# Altium footprint library Footprint.PcbLib: 411 footprints (part 14 of 26)
Each footprint in its own frame and in the unit in brackets; x right, y up, seen from the top. Pads: shape width x height; smd on the part's side, far side on the other; paste and mask are expansions set on the pad; w line width, h text height; cw(c..) or ccw(c..) is an arc to the next point about the centre after c.
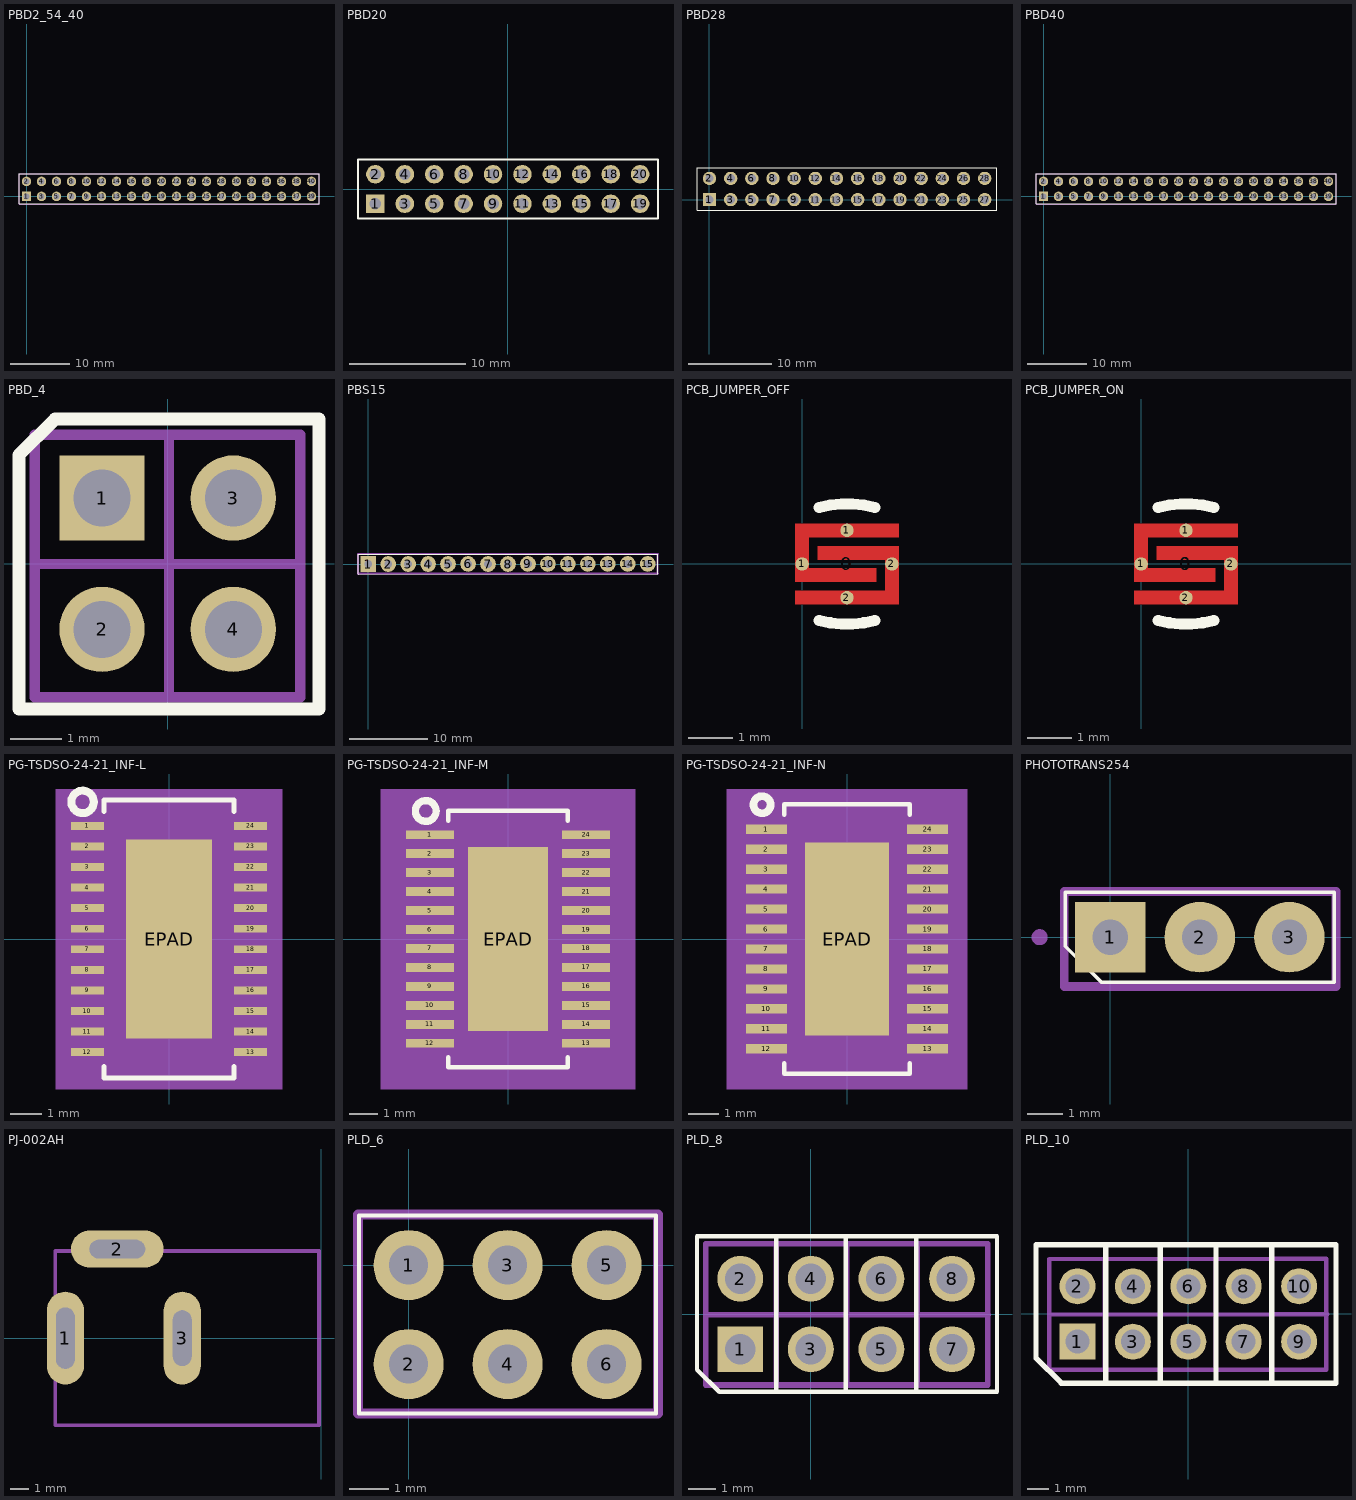
[diagram p13: the footprints below, top view; thin cyan lines are the x and y axes]

## PBD2_54_40 [mm]
pads (40):
  rect 1.6x1.6 hole 1: 1(0,0)
  round 1.6 hole 1: 2(0,2.54) 3(2.54,0) 4(2.54,2.54) 5(5.08,0) 6(5.08,2.54) 7(7.62,0) 8(7.62,2.54) 9(10.16,0) 10(10.16,2.54) 11(12.7,0) 12(12.7,2.54) 13(15.24,0) 14(15.24,2.54) 15(17.78,0) 16(17.78,2.54) 17(20.32,0) 18(20.32,2.54) 19(22.86,0) 20(22.86,2.54) 21(25.4,0) 22(25.4,2.54) 23(27.94,0) 24(27.94,2.54) 25(30.48,0) 26(30.48,2.54) 27(33.02,0) 28(33.02,2.54) 29(35.56,0) 30(35.56,2.54) 31(38.1,0) 32(38.1,2.54) 33(40.64,0) 34(40.64,2.54) 35(43.18,0) 36(43.18,2.54) 37(45.72,0) 38(45.72,2.54) 39(48.26,0) 40(48.26,2.54)
Top Overlay:
  lines w0.15: -1.27,-1.27 49.53,-1.27 49.53,3.81 -1.27,3.81 -1.27,-1.27
Mechanical 3:
  lines w0.1: -1.27,-1.295 -1.27,3.805 49.53,3.805 49.53,-1.295 -1.27,-1.295
3D body "User Library-PBD2_54-40.STEP": height 8.4, standoff -2.7, extent -1.263,-1.27 49.537,3.81

## PBD20 [mm]
pads (20):
  rect 1.6x1.6 hole 1: 1(-11.43,-1.27)
  round 1.6 hole 1: 2(-11.43,1.27) 3(-8.89,-1.27) 4(-8.89,1.27) 5(-6.35,-1.27) 6(-6.35,1.27) 7(-3.81,-1.27) 8(-3.81,1.27) 9(-1.27,-1.27) 10(-1.27,1.27) 11(1.27,-1.27) 12(1.27,1.27) 13(3.81,-1.27) 14(3.81,1.27) 15(6.35,-1.27) 16(6.35,1.27) 17(8.89,-1.27) 18(8.89,1.27) 19(11.43,-1.27) 20(11.43,1.27)
Top Overlay:
  lines w0.15: -12.93,-2.54 -12.93,2.54 12.97,2.54 12.97,-2.54 -12.93,-2.54
3D body "User Library-PBD_(DS1023-2)_2line_connectors_h=5_0_8_5mm_step_2_54mm (1).step": height 8.5, standoff -3, extent -12.95,-2.48 12.95,2.52

## PBD28 [mm]
pads (28):
  rect 1.6x1.6 hole 1: 1(0,0)
  round 1.6 hole 1: 2(0,2.54) 3(2.54,0) 4(2.54,2.54) 5(5.08,0) 6(5.08,2.54) 7(7.62,0) 8(7.62,2.54) 9(10.16,0) 10(10.16,2.54) 11(12.7,0) 12(12.7,2.54) 13(15.24,0) 14(15.24,2.54) 15(17.78,0) 16(17.78,2.54) 17(20.32,0) 18(20.32,2.54) 19(22.86,0) 20(22.86,2.54) 21(25.4,0) 22(25.4,2.54) 23(27.94,0) 24(27.94,2.54) 25(30.48,0) 26(30.48,2.54) 27(33.02,0) 28(33.02,2.54)
Top Overlay:
  lines w0.15: -1.5,-1.27 -1.5,3.81 34.5,3.81 34.5,-1.27 -1.5,-1.27
3D body "User Library-PBD_(DS1023-2)_2line_connectors_h=5_0_8_5mm_step_2_54mm.step": height 8.5, standoff -3, extent -1.52,-1.21 34.54,3.79

## PBD40 [mm]
pads (40):
  rect 1.6x1.6 hole 1: 1(0,0)
  round 1.6 hole 1: 2(0,2.54) 3(2.54,0) 4(2.54,2.54) 5(5.08,0) 6(5.08,2.54) 7(7.62,0) 8(7.62,2.54) 9(10.16,0) 10(10.16,2.54) 11(12.7,0) 12(12.7,2.54) 13(15.24,0) 14(15.24,2.54) 15(17.78,0) 16(17.78,2.54) 17(20.32,0) 18(20.32,2.54) 19(22.86,0) 20(22.86,2.54) 21(25.4,0) 22(25.4,2.54) 23(27.94,0) 24(27.94,2.54) 25(30.48,0) 26(30.48,2.54) 27(33.02,0) 28(33.02,2.54) 29(35.56,0) 30(35.56,2.54) 31(38.1,0) 32(38.1,2.54) 33(40.64,0) 34(40.64,2.54) 35(43.18,0) 36(43.18,2.54) 37(45.72,0) 38(45.72,2.54) 39(48.26,0) 40(48.26,2.54)
Top Overlay:
  lines w0.15: -1.27,-1.27 49.53,-1.27 49.53,3.81 -1.27,3.81 -1.27,-1.27
Mechanical 3:
  lines w0.1: -1.27,-1.295 -1.27,3.805 49.53,3.805 49.53,-1.295 -1.27,-1.295
3D body "User Library-PBD2_54-40.STEP": height 8.4, standoff -2.7, extent -1.263,-1.27 49.537,3.81

## PBD_4 [mm] "HEADER_2X2"
pads (4):
  rect 1.65x1.65 hole 1.1: 1(-1.27,1.27)
  round 1.65 hole 1.1: 2(-1.27,-1.27) 3(1.27,1.27) 4(1.27,-1.27)
Top Overlay:
  lines w0.25: -2.875,-2.805 -2.875,2.105 -2.179,2.795 2.925,2.795 2.925,-2.805 -2.875,-2.805
Assembly Bottom:
  lines w0.2: -2.57,2.495 -2.57,-2.58 2.49,-2.58 2.565,-2.58 ; -2.515,-0.005 2.565,-0.005 ; -2.515,2.495 2.565,2.495 2.565,-2.505 2.565,-2.58 ; 0.025,-2.505 0.025,2.495 ; 2.565,-2.58 2.565,-2.58
3D body "PBD.STEP": height 2.5, standoff -9, extent 0.025,-2.505 2.565,2.495
3D body "PBD.STEP": height 2.5, standoff -9, extent -2.515,-2.505 0.025,2.495

## PBS15 [mm]
pads (15):
  rect 2x2 hole 1: 1(0,0)
  round 2 hole 1: 2(2.54,0) 3(5.08,0) 4(7.62,0) 5(10.15,0) 6(12.7,0.01) 7(15.24,0) 8(17.78,0) 9(20.32,0.01) 10(22.86,0.01) 11(25.4,0.01) 12(27.94,0.01) 13(30.48,0.01) 14(33.02,0.01) 15(35.56,0.01)
Top Overlay:
  lines w0.1: -1.28,-1.28 36.83,-1.265 36.83,1.27 -1.27,1.27 -1.27,-1.27
Mechanical 15:
  circle w0.254: c0,0 r0.361
  lines w0.254: 36.8,-1.3 36.8,1.3 ; 36.83,-1.2 -1.2,-1.2 -1.3,-1.3 -1.3,1.3 36.86,1.3
3D body "User Library-PBS_(DS1023)_1line_connectors_h=5_0_8_5mm_step_2_54mm-1.step": height 8.5, standoff -3, extent -1.52,-1.25 29.46,1.25
3D body "User Library-PBS_(DS1023)_1line_connectors_h=5_0_8_5mm_step_2_54mm-1 (1).step": height 8.5, standoff -3, extent 28.96,-1.25 37.08,1.25

## PCB_JUMPER_OFF [mm] "soldable jumper OFF state"
pads (5):
  rect 2.5x2 on Top Solder: 0(1,0)
  round 0.3 smd paste-50 mask-50: 1(0,0) 1(1,0.75) 2(1,-0.75) 2(2,0)
Top Layer:
  region: 2.15,0.4 2.15,-0.9 -0.15,-0.9 -0.15,-0.6 1.85,-0.6 1.85,0.1 0.35,0.1 0.35,0.4
  region: -0.15,-0.4 -0.15,0.9 2.15,0.9 2.15,0.6 0.15,0.6 0.15,-0.1 1.65,-0.1 1.65,-0.4
Top Overlay:
  lines w0.25: 0.38,-1.257 ccw(c1,1) 1.62,-1.257 ; 0.384,1.258 cw(c1,-1) 1.616,1.258

## PCB_JUMPER_ON [mm] "soldable jumper ON state"
pads (6):
  rect 2.5x2 on Top Paste: 0(1,0)
  rect 2.5x2 on Top Solder: 0(1,0)
  round 0.3 smd paste-50 mask-50: 1(0,0) 1(1,0.75) 2(1,-0.75) 2(2,0)
Top Layer:
  region: -0.15,-0.4 -0.15,0.9 2.15,0.9 2.15,0.6 0.15,0.6 0.15,-0.1 1.65,-0.1 1.65,-0.4
  region: 2.15,0.4 2.15,-0.9 -0.15,-0.9 -0.15,-0.6 1.85,-0.6 1.85,0.1 0.35,0.1 0.35,0.4
Top Overlay:
  lines w0.25: 0.38,-1.257 ccw(c1,1) 1.62,-1.257 ; 0.384,1.258 cw(c1,-1) 1.616,1.258

## PG-TSDSO-24-21_INF-L [mil]
pads (25):
  rect 41.75x10 smd paste+0 mask+0: 1(-103.03,143) 2(-103.03,117) 3(-103.03,91) 4(-103.03,65) 5(-103.03,39) 6(-103.03,13) 7(-103.03,-13) 8(-103.03,-39) 9(-103.03,-65) 10(-103.03,-91) 11(-103.03,-117) 12(-103.03,-143) 13(103.03,-143) 14(103.03,-117) 15(103.03,-91) 16(103.03,-65) 17(103.03,-39) 18(103.03,-13) 19(103.03,13) 20(103.03,39) 21(103.03,65) 22(103.03,91) 23(103.03,117) 24(103.03,143)
  rect 109x252 smd paste-125.5 mask+0: EPAD(0,0)
Top Overlay:
  circle w10: c-109.19,173.2 r14.2
  lines w6: -82,-161.1 -82,-175.5 82,-175.5 82,-161.1 ; -82,161.1 -82,175.5 82,175.5 82,161.1
Top Paste:
  region: -3.94,122.06 -50.56,122.06 -50.56,79.54 -3.94,79.54
  region: -3.94,71.66 -50.56,71.66 -50.56,29.14 -3.94,29.14
  region: -3.94,21.26 -50.56,21.26 -50.56,-21.26 -3.94,-21.26
  region: -3.94,-29.14 -50.56,-29.14 -50.56,-71.66 -3.94,-71.66
  region: -3.94,-79.54 -50.56,-79.54 -50.56,-122.06 -3.94,-122.06
  region: 50.56,122.06 3.94,122.06 3.94,79.54 50.56,79.54
  region: 50.56,71.66 3.94,71.66 3.94,29.14 50.56,29.14
  region: 50.56,21.26 3.94,21.26 3.94,-21.26 50.56,-21.26
  region: 50.56,-29.14 3.94,-29.14 3.94,-71.66 50.56,-71.66
  region: 50.56,-79.54 3.94,-79.54 3.94,-122.06 50.56,-122.06
Assembly Bottom:
  region: 142.91,-189.5 -142.91,-189.5 -142.91,189.5 142.91,189.5
Mechanical 13:
  lines w0: -12,170.5 ccw(c0,170.5) 12,170.5
  lines w1: -118,-148 -118,-138 -77,-138 -77,-148 -118,-148 ; -118,-122 -118,-112 -77,-112 -77,-122 -118,-122 ; -118,-96 -118,-86 -77,-86 -77,-96 -118,-96 ; -118,-70 -118,-60 -77,-60 -77,-70 -118,-70 ; -118,-44 -118,-34 -77,-34 -77,-44 -118,-44 ; -118,-18 -118,-8 -77,-8 -77,-18 -118,-18 ; -118,8 -118,18 -77,18 -77,8 -118,8 ; -118,34 -118,44 -77,44 -77,34 -118,34 ; -118,60 -118,70 -77,70 -77,60 -118,60 ; -118,86 -118,96 -77,96 -77,86 -118,86 ; -118,112 -118,122 -77,122 -77,112 -118,112 ; -118,138 -118,148 -77,148 -77,138 -118,138 ; -77,-170.5 77,-170.5 77,170.5 -77,170.5 -77,-170.5 ; 77,-148 77,-138 118,-138 118,-148 77,-148 ; 77,-122 77,-112 118,-112 118,-122 77,-122 ; 77,-96 77,-86 118,-86 118,-96 77,-96 ; 77,-70 77,-60 118,-60 118,-70 77,-70 ; 77,-44 77,-34 118,-34 118,-44 77,-44 ; 77,-18 77,-8 118,-8 118,-18 77,-18 ; 77,8 77,18 118,18 118,8 77,8 ; 77,34 77,44 118,44 118,34 77,34 ; 77,60 77,70 118,70 118,60 77,60 ; 77,86 77,96 118,96 118,86 77,86 ; 77,112 77,122 118,122 118,112 77,112 ; 77,138 77,148 118,148 118,138 77,138
  text "*" at -74.5,117.5 h50
Mechanical 15:
  region: -81,-152 -127.91,-152 -127.91,152 -81,152 -81,174.5 81,174.5 81,152 127.91,152 127.91,-152 81,-152 81,-174.5 -81,-174.5
  lines w6: -127.91,-152 -127.91,152 -81,152 -81,174.5 81,174.5 81,152 127.91,152 127.91,-152 81,-152 81,-174.5 -81,-174.5 -81,-152 -127.91,-152
3D body "PG-TSDSO-24-21_INF.step": height 45.12, standoff 0, extent -117.99,-170.51 118,170.52

## PG-TSDSO-24-21_INF-M [mil]
pads (25):
  rect 65.37x11.97 smd paste+0 mask+0: 1(-106.97,143) 2(-106.97,117) 3(-106.97,91) 4(-106.97,65) 5(-106.97,39) 6(-106.97,13) 7(-106.97,-13) 8(-106.97,-39) 9(-106.97,-65) 10(-106.97,-91) 11(-106.97,-117) 12(-106.97,-143) 13(106.97,-143) 14(106.97,-117) 15(106.97,-91) 16(106.97,-65) 17(106.97,-39) 18(106.97,-13) 19(106.97,13) 20(106.97,39) 21(106.97,65) 22(106.97,91) 23(106.97,117) 24(106.97,143)
  rect 109x252 smd paste-125.5 mask+0: EPAD(0,0)
Top Overlay:
  circle w10: c-112.7,175.37 r14.2
  lines w6: -82,-162.08 -82,-175.5 82,-175.5 82,-162.08 ; -82,162.08 -82,175.5 82,175.5 82,162.08
Top Paste:
  region: 50.56,-79.54 3.94,-79.54 3.94,-122.06 50.56,-122.06
  region: 50.56,-29.14 3.94,-29.14 3.94,-71.66 50.56,-71.66
  region: 50.56,21.26 3.94,21.26 3.94,-21.26 50.56,-21.26
  region: 50.56,71.66 3.94,71.66 3.94,29.14 50.56,29.14
  region: 50.56,122.06 3.94,122.06 3.94,79.54 50.56,79.54
  region: -3.94,-79.54 -50.56,-79.54 -50.56,-122.06 -3.94,-122.06
  region: -3.94,-29.14 -50.56,-29.14 -50.56,-71.66 -3.94,-71.66
  region: -3.94,21.26 -50.56,21.26 -50.56,-21.26 -3.94,-21.26
  region: -3.94,71.66 -50.56,71.66 -50.56,29.14 -3.94,29.14
  region: -3.94,122.06 -50.56,122.06 -50.56,79.54 -3.94,79.54
Assembly Bottom:
  region: 174.65,-205.5 -174.65,-205.5 -174.65,205.5 174.65,205.5
Mechanical 13:
  lines w0: -12,170.5 ccw(c0,170.5) 12,170.5
  lines w1: -118,-148 -77,-148 -77,-138 -118,-138 -118,-148 ; -118,-122 -77,-122 -77,-112 -118,-112 -118,-122 ; -118,-96 -77,-96 -77,-86 -118,-86 -118,-96 ; -118,-70 -77,-70 -77,-60 -118,-60 -118,-70 ; -118,-44 -77,-44 -77,-34 -118,-34 -118,-44 ; -118,-18 -77,-18 -77,-8 -118,-8 -118,-18 ; -118,8 -77,8 -77,18 -118,18 -118,8 ; -118,34 -77,34 -77,44 -118,44 -118,34 ; -118,60 -77,60 -77,70 -118,70 -118,60 ; -118,86 -77,86 -77,96 -118,96 -118,86 ; -118,112 -77,112 -77,122 -118,122 -118,112 ; -118,138 -77,138 -77,148 -118,148 -118,138 ; -77,-170.5 -77,170.5 77,170.5 77,-170.5 -77,-170.5 ; 77,-148 118,-148 118,-138 77,-138 77,-148 ; 77,-122 118,-122 118,-112 77,-112 77,-122 ; 77,-96 118,-96 118,-86 77,-86 77,-96 ; 77,-70 118,-70 118,-60 77,-60 77,-70 ; 77,-44 118,-44 118,-34 77,-34 77,-44 ; 77,-18 118,-18 118,-8 77,-8 77,-18 ; 77,8 118,8 118,18 77,18 77,8 ; 77,34 118,34 118,44 77,44 77,34 ; 77,60 118,60 118,70 77,70 77,60 ; 77,86 118,86 118,96 77,96 77,86 ; 77,112 118,112 118,122 77,122 77,112 ; 77,138 118,138 118,148 77,148 77,138
  text "*" at -74.5,117.5 h50
Mechanical 15:
  region: -97,-168.98 -159.65,-168.98 -159.65,168.98 -97,168.98 -97,190.5 97,190.5 97,168.98 159.65,168.98 159.65,-168.98 97,-168.98 97,-190.5 -97,-190.5
  lines w6: -159.65,-168.98 -97,-168.98 -97,-190.5 97,-190.5 97,-168.98 159.65,-168.98 159.65,168.98 97,168.98 97,190.5 -97,190.5 -97,168.98 -159.65,168.98 -159.65,-168.98
3D body "PG-TSDSO-24-21_INF.step": height 45.12, standoff 0, extent -117.99,-170.51 118,170.52

## PG-TSDSO-24-21_INF-N [mil]
pads (25):
  rect 53.56x11.97 smd paste+0 mask+0: 1(-105,143) 2(-105,117) 3(-105,91) 4(-105,65) 5(-105,39) 6(-105,13) 7(-105,-13) 8(-105,-39) 9(-105,-65) 10(-105,-91) 11(-105,-117) 12(-105,-143) 13(105,-143) 14(105,-117) 15(105,-91) 16(105,-65) 17(105,-39) 18(105,-13) 19(105,13) 20(105,39) 21(105,65) 22(105,91) 23(105,117) 24(105,143)
  rect 109x252 smd paste-125.5 mask+0: EPAD(0,0)
Top Overlay:
  circle w10: c-110.71,174.99 r11.14
  lines w6: -82,-162.08 -82,-175.5 82,-175.5 82,-162.08 ; -82,162.08 -82,175.5 82,175.5 82,162.08
Top Paste:
  region: 50.56,-79.54 3.94,-79.54 3.94,-122.06 50.56,-122.06
  region: 50.56,-29.14 3.94,-29.14 3.94,-71.66 50.56,-71.66
  region: 50.56,21.26 3.94,21.26 3.94,-21.26 50.56,-21.26
  region: 50.56,71.66 3.94,71.66 3.94,29.14 50.56,29.14
  region: 50.56,122.06 3.94,122.06 3.94,79.54 50.56,79.54
  region: -3.94,-79.54 -50.56,-79.54 -50.56,-122.06 -3.94,-122.06
  region: -3.94,-29.14 -50.56,-29.14 -50.56,-71.66 -3.94,-71.66
  region: -3.94,21.26 -50.56,21.26 -50.56,-21.26 -3.94,-21.26
  region: -3.94,71.66 -50.56,71.66 -50.56,29.14 -3.94,29.14
  region: -3.94,122.06 -50.56,122.06 -50.56,79.54 -3.94,79.54
Assembly Bottom:
  region: 156.78,-195.5 -156.78,-195.5 -156.78,195.5 156.78,195.5
Mechanical 13:
  lines w0: -12,170.5 ccw(c0,170.5) 12,170.5
  lines w1: -118,-148 -77,-148 -77,-138 -118,-138 -118,-148 ; -118,-122 -77,-122 -77,-112 -118,-112 -118,-122 ; -118,-96 -77,-96 -77,-86 -118,-86 -118,-96 ; -118,-70 -77,-70 -77,-60 -118,-60 -118,-70 ; -118,-44 -77,-44 -77,-34 -118,-34 -118,-44 ; -118,-18 -77,-18 -77,-8 -118,-8 -118,-18 ; -118,8 -77,8 -77,18 -118,18 -118,8 ; -118,34 -77,34 -77,44 -118,44 -118,34 ; -118,60 -77,60 -77,70 -118,70 -118,60 ; -118,86 -77,86 -77,96 -118,96 -118,86 ; -118,112 -77,112 -77,122 -118,122 -118,112 ; -118,138 -77,138 -77,148 -118,148 -118,138 ; -77,-170.5 -77,170.5 77,170.5 77,-170.5 -77,-170.5 ; 77,-148 118,-148 118,-138 77,-138 77,-148 ; 77,-122 118,-122 118,-112 77,-112 77,-122 ; 77,-96 118,-96 118,-86 77,-86 77,-96 ; 77,-70 118,-70 118,-60 77,-60 77,-70 ; 77,-44 118,-44 118,-34 77,-34 77,-44 ; 77,-18 118,-18 118,-8 77,-8 77,-18 ; 77,8 118,8 118,18 77,18 77,8 ; 77,34 118,34 118,44 77,44 77,34 ; 77,60 118,60 118,70 77,70 77,60 ; 77,86 118,86 118,96 77,96 77,86 ; 77,112 118,112 118,122 77,122 77,112 ; 77,138 118,138 118,148 77,148 77,138
  text "*" at -74.5,117.5 h50
Mechanical 15:
  region: -87,-158.98 -141.78,-158.98 -141.78,158.98 -87,158.98 -87,180.5 87,180.5 87,158.98 141.78,158.98 141.78,-158.98 87,-158.98 87,-180.5 -87,-180.5
  lines w6: -141.78,-158.98 -87,-158.98 -87,-180.5 87,-180.5 87,-158.98 141.78,-158.98 141.78,158.98 87,158.98 87,180.5 -87,180.5 -87,158.98 -141.78,158.98 -141.78,-158.98
3D body "PG-TSDSO-24-21_INF.step": height 45.12, standoff 0, extent -117.99,-170.51 118,170.52

## PHOTOTRANS254 [mm]
pads (3):
  rect 2x2 hole 1: 1(0,0)
  round 2 hole 1: 2(2.54,0) 3(5.08,0)
Top Overlay:
  lines w0.1: -1.27,-0.254 -0.254,-1.27 6.35,-1.27 6.35,1.27 -1.27,1.27 -1.27,-0.254
Mechanical 15:
  circle w0.254: c-2,0 r0.1
  lines w0.254: -1.3,-1.4 -1.3,1.3 6.4,1.3 6.4,-1.4 -1.3,-1.4
  text ".Designator" at -1.2,1.6 h1.52

## PJ-002AH [mm]
pads (3):
  oval 2x5 hole 1 slot 3.3 at 90 deg: 1(-13.8,0)
  oval 5x2 hole 1 slot 3 at 0 deg: 2(-11,4.8)
  oval 2x5 hole 1 slot 3 at 90 deg: 3(-7.5,0)
Mechanical 13:
  lines w0.2: -14.351,-4.699 -0.127,-4.699 -0.127,4.699 -14.351,4.699 -14.351,-4.699
  text ".Designator" at -11.811,-4.064 h1.5
3D body "DJK-02A.step": height 11, standoff -3.78, extent -14.254,-4.65 -0.254,4.65

## PLD_6 [mm]
pads (6):
  round 1.8 hole 1: 1(0,0) 2(0,-2.54) 3(2.54,0) 4(2.54,-2.54) 5(5.08,0) 6(5.08,-2.54)
Top Overlay:
  lines w0.1: -1.27,-3.81 -1.27,1.27 6.35,1.27 6.35,-3.81 -1.27,-3.81
Mechanical 15:
  circle w0.254: c0,0 r0.224
  lines w0.254: -1.3,-3.81 -1.3,1.3 6.4,1.3 6.4,-3.81 -1.3,-3.81
  text ".Designator" at -0.5,1.5 h1.52

## PLD_8 [mm] "HEADER_2X4"
pads (8):
  rect 1.65x1.65 hole 1.1: 1(-2.54,-1.27)
  round 1.65 hole 1.1: 2(-2.54,1.27) 3(0,-1.27) 4(0,1.27) 5(2.54,-1.27) 6(2.54,1.27) 7(5.08,-1.27) 8(5.08,1.27)
Top Overlay:
  lines w0.15: -1.245,-2.8 -1.245,2.8 ; 1.255,-2.8 1.255,2.8 ; 3.795,-2.8 3.795,2.8 ; -4.1,-2.005 -4.1,2.8 6.7,2.8 6.7,-2.8 -3.298,-2.8 -4.1,-2.005
Mechanical 1:
  lines w0.2: -3.79,-2.555 -1.25,-2.555 1.29,-2.555 3.83,-2.555 6.37,-2.555 ; -3.79,-2.495 -3.79,2.525 -1.25,2.525 ; -3.785,-0.02 -1.245,-0.02 1.295,-0.02 3.835,-0.02 6.375,-0.02 ; 6.37,-2.495 6.37,2.525 3.83,2.525 ; -1.25,2.525 -1.25,-2.495 -1.25,2.525 ; -1.25,2.525 1.29,2.525 ; 1.29,2.525 1.29,-2.495 1.29,2.525 ; 1.29,2.525 3.83,2.525 ; 3.83,2.525 3.83,-2.495 3.83,2.525
3D body "PLD.STEP": height 8.64, standoff -2.9, extent 3.835,-2.495 6.375,2.505
3D body "PLD.STEP": height 8.64, standoff -2.9, extent -3.785,-2.495 -1.245,2.505
3D body "PLD.STEP": height 8.64, standoff -2.9, extent -1.245,-2.495 1.295,2.505
3D body "PLD.STEP": height 8.64, standoff -2.9, extent 1.295,-2.495 3.835,2.505

## PLD_10 [mm] "HEADER_2X5"
pads (10):
  rect 1.65x1.65 hole 1.1: 1(-5.08,-1.27)
  round 1.65 hole 1.1: 2(-5.08,1.27) 3(-2.54,-1.27) 4(-2.54,1.27) 5(0,-1.27) 6(0,1.27) 7(2.54,-1.27) 8(2.54,1.27) 9(5.08,-1.27) 10(5.08,1.27)
Top Overlay:
  lines w0.25: -3.78,-3.17 -3.78,3.17 ; -1.28,-3.17 -1.28,3.17 ; 1.27,-3.17 1.27,3.17 ; 3.82,-3.17 3.82,3.17 ; -6.98,-2.02 -5.82,-3.17 6.77,-3.17 6.77,3.17 -6.98,3.17 -6.98,-2.02
Mechanical 1:
  lines w0.2: -3.825,-2.56 -3.825,-0.02 -3.825,2.52 ; -1.285,-2.56 -1.285,-0.02 -1.285,2.52 ; 1.255,-2.56 1.255,-0.02 1.255,2.52 ; 3.83,-2.595 3.83,2.525 6.32,2.525 6.32,-2.555 3.83,-2.555 ; 3.83,-0.015 6.37,-0.015 ; -6.365,-0.02 -6.365,2.52 3.795,2.52 3.795,-0.02 ; -6.365,-0.02 3.795,-0.02 ; -6.365,-0.02 3.795,-0.02 ; -6.365,-0.02 -6.365,-2.56 3.795,-2.56 3.795,-0.02
3D body "PLD.STEP": height 8.64, standoff -2.9, extent 3.835,-2.495 6.375,2.505
3D body "PLD.STEP": height 8.64, standoff -2.9, extent 1.295,-2.495 3.835,2.505
3D body "PLD.STEP": height 8.64, standoff -2.9, extent -1.245,-2.495 1.295,2.505
3D body "PLD.STEP": height 8.64, standoff -2.9, extent -3.785,-2.495 -1.245,2.505
3D body "PLD.STEP": height 8.64, standoff -2.9, extent -6.325,-2.495 -3.785,2.505